# Altium footprint library Connectors.PcbLib: 63 footprints (part 3 of 4)
Each footprint in its own frame and in the unit in brackets; x right, y up, seen from the top. Pads: shape width x height; smd on the part's side, far side on the other; paste and mask are expansions set on the pad; w line width, h text height; cw(c..) or ccw(c..) is an arc to the next point about the centre after c.
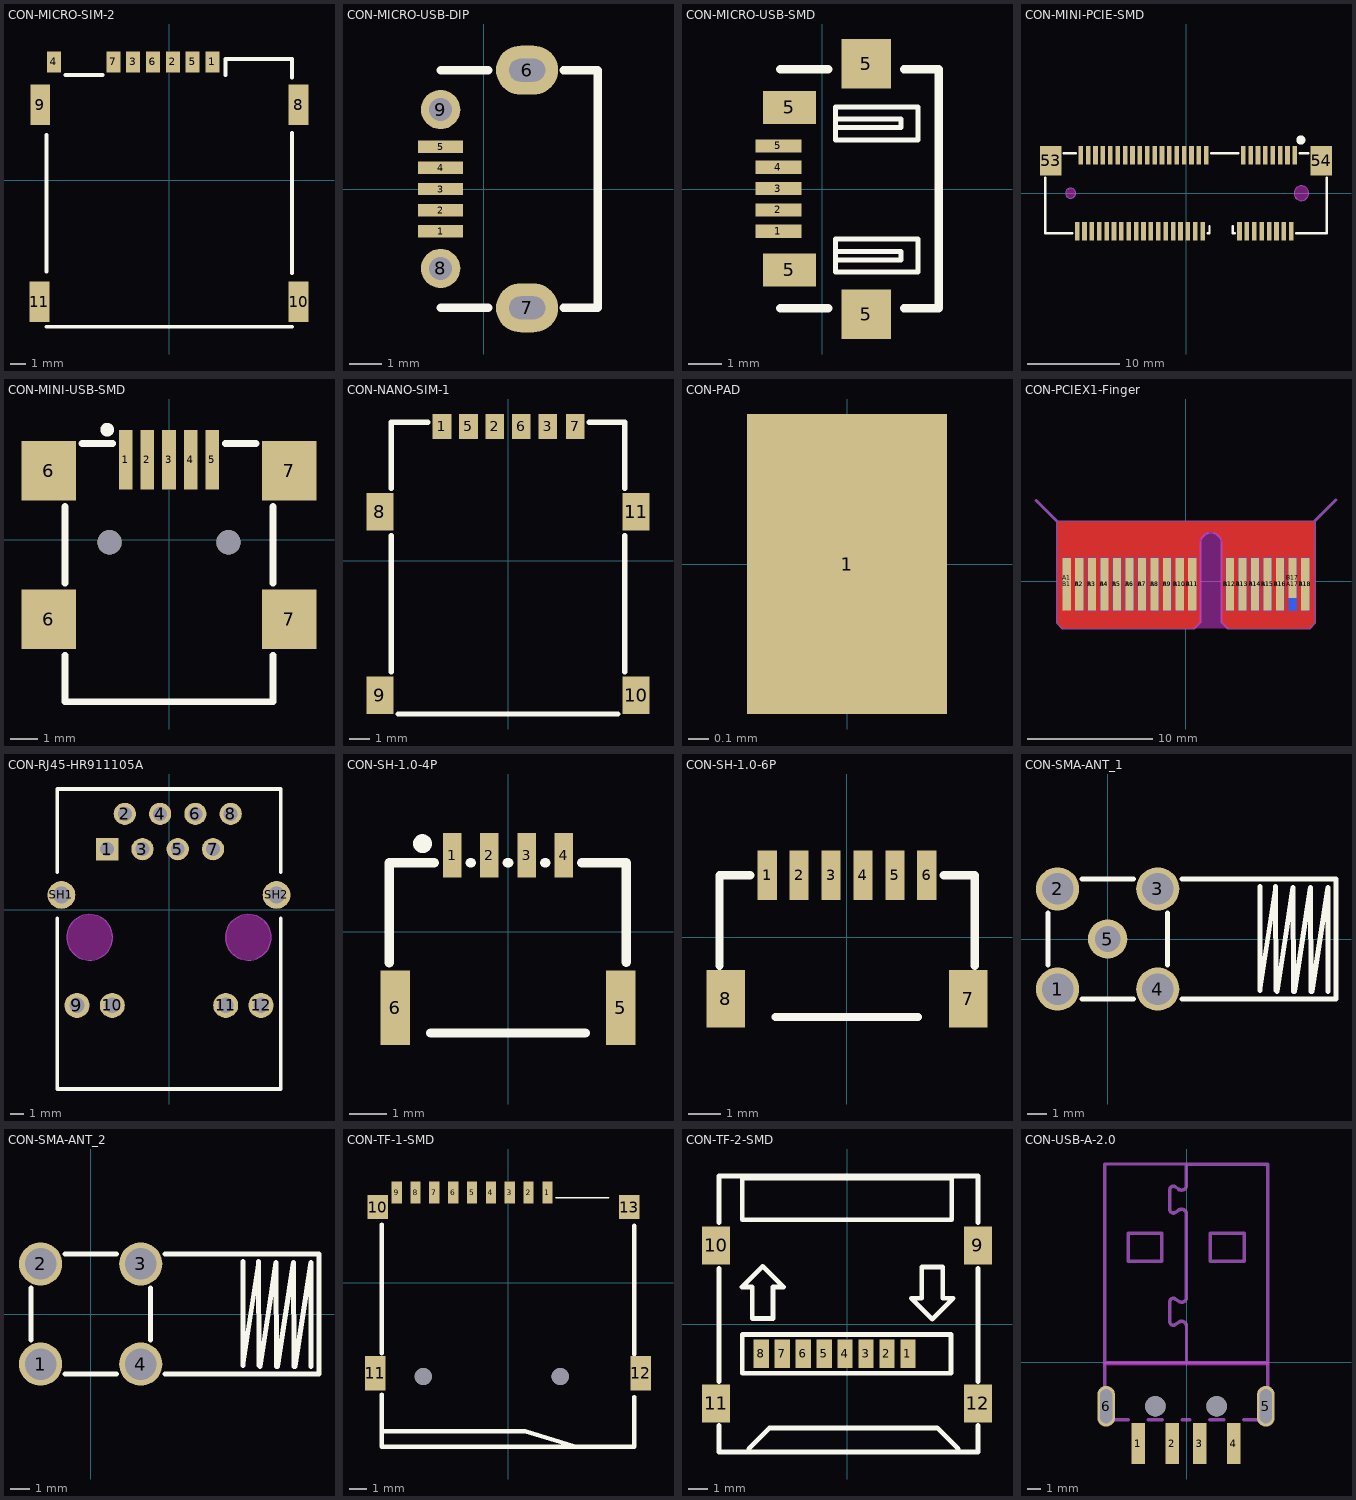
[diagram p2: the footprints below, top view; thin cyan lines are the x and y axes]

## CON-MICRO-SIM-2 [mm] "SIM Card Socket Connectors"
pads (11):
  rect 0.9x1.35 smd: 1(2.782,7.59) 2(0.242,7.59) 3(-2.298,7.59) 4(-7.378,7.59) 5(1.512,7.59) 6(-1.028,7.59) 7(-3.568,7.59)
  rect 1.27x2.61 smd: 8(8.303,4.84) 9(-8.247,4.84) 10(8.303,-7.78) 11(-8.303,-7.78)
Top Overlay:
  lines w0.254: -7.858,-9.38 7.892,-9.38 ; -7.858,-5.85 -7.858,2.9 ; -6.63,6.75 -4.26,6.75 ; 3.627,6.75 3.627,7.78 7.892,7.78 7.892,6.57 ; 7.892,-5.94 7.892,3.02
3D body "SMD8.STEP": height 1.53, standoff -0.02, extent -8.375,-9.385 8.375,7.785

## CON-MICRO-USB-DIP [mil] "USB Micro SMT Connectors"
height 118.11
pads (9):
  rect 54x15 smd: 1(-52,-51) 2(-52,-25.5) 3(-52,0) 4(-52,25.5) 5(-52,51)
  oval 74.8x59.06 hole 27.56 slot 43.31 at 0 deg: 6(52,143) 7(52,-143)
  round 47.24 hole 27.5: 8(-52,-95.5) 9(-52,95.5)
Top Overlay:
  lines w10: -52,-142.72 5.28,-142.72 ; -52,142.72 5.28,142.72 ; 95.72,-142.72 136.98,-142.72 136.98,142.72 95.72,142.72
3D body "User Library-Micro USB-B_Molex_105017-0001.step": height 105.31, standoff -24.61, extent -61.33,-161.41 152.44,161.42

## CON-MICRO-USB-SMD [mm] "USB Micro SMT Connectors"
height 3
pads (9):
  rect 1.4x0.4 smd: 1(-1.333,-1.283) 2(-1.333,-0.635) 3(-1.333,0.013) 4(-1.333,0.66) 5(-1.333,1.308)
  rect 1.6x1 smd: 5(-1.003,-2.451) 5(-1.003,2.476)
  rect 1.5x1.5 smd: 5(1.333,-3.797) 5(1.333,3.797)
Top Overlay:
  lines w0.152: 0.394,-2.152 2.379,-2.152 2.379,-1.949 2.379,-1.898 0.394,-1.898 ; 0.394,1.861 2.379,1.861 2.379,2.115 0.394,2.115 ; 0.394,-2.513 0.394,-1.513 2.894,-1.513 2.894,-2.513 0.394,-2.513 ; 0.394,1.487 0.394,2.487 2.894,2.487 2.894,1.487 0.394,1.487
  lines w0.254: -1.28,-3.62 0.175,-3.62 ; -1.28,3.63 0.175,3.63 ; 2.472,-3.62 3.52,-3.62 3.52,3.63 2.472,3.63
3D body "USB-MICRO B型 ?": height 2.69, standoff -0.24, extent -1.628,-3.969 3.794,3.995

## CON-MINI-PCIE-SMD [mm] "PCIE-SMD_52P-P0.80_PCIE-52P"
pads (54):
  rect 0.5x2 smd paste+0 mask+0.051: 1(11.8,4.1) 2(11.4,-4.1) 3(11,4.1) 4(10.6,-4.1) 5(10.2,4.1) 6(9.8,-4.1) 7(9.4,4.1) 8(9,-4.1) 9(8.6,4.1) 10(8.2,-4.1) 11(7.8,4.1) 12(7.4,-4.1) 13(7,4.1) 14(6.6,-4.1) 15(6.2,4.1) 16(5.8,-4.1) 17(2.2,4.1) 18(1.8,-4.1) 19(1.4,4.1) 20(1,-4.1) 21(0.6,4.1) 22(0.2,-4.1) 23(-0.2,4.1) 24(-0.6,-4.1) 25(-1,4.1) 26(-1.4,-4.1) 27(-1.8,4.1) 28(-2.2,-4.1) 29(-2.6,4.1) 30(-3,-4.1) 31(-3.4,4.1) 32(-3.8,-4.1) 33(-4.2,4.1) 34(-4.6,-4.1) 35(-5,4.1) 36(-5.4,-4.1) 37(-5.8,4.1) 38(-6.2,-4.1) 39(-6.6,4.1) 40(-7,-4.1) 41(-7.4,4.1) 42(-7.8,-4.1) 43(-8.2,4.1) 44(-8.6,-4.1) 45(-9,4.1) 46(-9.4,-4.1) 47(-9.8,4.1) 48(-10.2,-4.1) 49(-10.6,4.1) 50(-11,-4.1) 51(-11.4,4.1) 52(-11.8,-4.1)
  rect 2.3x3.2 smd paste+0 mask+0.051: 53(-14.65,3.5) 54(14.65,3.5)
Top Overlay:
  circle w0.5: c12.45,5.77 r0.25
  lines w0.254: -15.239,1.669 -15.239,-4.318 -14.985,-4.318 -12.331,-4.318 ; -13.269,4.318 -11.931,4.318 ; 2.331,-4.318 2.54,-4.318 2.54,-3.556 ; 2.731,4.318 5.669,4.318 ; 5.081,-3.556 5.081,-4.318 5.269,-4.318 ; 11.931,-4.318 14.987,-4.318 15.241,-4.318 15.241,1.669 ; 12.331,4.318 13.269,4.318
Keep-Out Layer:
  board cut-out: -13.05,0 -13.05,-0.11 -12.966,-0.312 -12.811,-0.466 -12.609,-0.55 -12.39,-0.55 -12.188,-0.466 -12.034,-0.312 -11.95,-0.11 -11.95,0 -11.95,0.109 -12.034,0.311 -12.188,0.466 -12.39,0.55 -12.609,0.55 -12.811,0.466 -12.966,0.311 -13.05,0.109
  board cut-out: 11.7,0 11.7,-0.105 11.755,-0.309 11.86,-0.491 12.009,-0.64 12.191,-0.746 12.395,-0.8 12.605,-0.8 12.809,-0.746 12.991,-0.64 13.14,-0.491 13.246,-0.309 13.3,-0.105 13.3,0 13.3,0.105 13.246,0.309 13.14,0.491 12.991,0.64 12.809,0.745 12.605,0.8 12.395,0.8 12.191,0.745 12.009,0.64 11.86,0.491 11.755,0.309 11.7,0.105
Mechanical 1:
  circle w0.005: c-12.5,0 r0.55
  circle w0.005: c12.5,0 r0.8
3D body "2041119-1.stp": height 4.05, standoff -0.6, extent -14.95,-4.11 14.95,4.98

## CON-MINI-USB-SMD [mm] "USB Connectors"
pads (11):
  rect 0.5x2.2 smd: 1(-1.6,2.95) 2(-0.8,2.95) 3(0,2.95) 4(0.8,2.95) 5(1.6,2.95)
  rect 2x2.2 smd: 6(-4.45,-2.95) 6(-4.45,2.55) 7(4.45,-2.95) 7(4.45,2.55)
  round 0.9 hole 0.9 unplated: ""(-2.2,-0.1) ""(2.2,-0.1)
Top Overlay:
  circle w0.254: c-2.286,4.064 r0.127
  lines w0.254: -3.85,-4.281 -3.85,-6 3.85,-6 3.85,-4.281 ; -3.85,-1.619 -3.85,1.219 ; -3.219,3.556 -2.081,3.556 ; 2.081,3.556 3.219,3.556 ; 3.85,-1.619 3.85,1.219
3D body "usb_a-usb_b-m5-smd-c.stp": height 4.02, standoff -0.83, extent -4.95,-6 4.95,3.2

## CON-NANO-SIM-1 [mm] "SIM Card Socket Connectors"
pads (10):
  rect 0.9x1.2 smd: 1(-3.17,6.45) 2(-0.63,6.45) 3(1.91,6.45) 5(-1.9,6.45) 6(0.64,6.45) 7(3.225,6.45)
  rect 1.3x1.8 smd: 8(-6.15,2.35) 9(-6.15,-6.45) 10(6.15,-6.45) 11(6.15,2.35)
Top Overlay:
  lines w0.254: -5.6,-5.319 -5.6,1.219 ; -5.6,3.481 -5.6,6.65 -3.851,6.65 ; -5.269,-7.35 5.269,-7.35 ; 3.906,6.65 5.6,6.65 5.6,3.481 ; 5.6,-5.319 5.6,1.219
3D body "SMD.step": height 1.51, standoff 0, extent -6.2,-7.404 6.2,6.796

## CON-PAD [mm] "CONNECTOR"
pads (1):
  rect 1x1.5 smd: 1(0,0)

## CON-PCIEX1-Finger [mm] "PCI-E X1 FInger"
height 2.8
pads (36):
  rect 0.65x3.2 smd far side paste-1 mask+0.051: A1(-9.5,0.25)
  rect 0.65x4.2 smd far side paste-1 mask+0.051: A2(-8.5,-0.25) A3(-7.5,-0.25) A4(-6.5,-0.25) A5(-5.5,-0.25) A6(-4.5,-0.25) A7(-3.5,-0.25) A8(-2.5,-0.25) A9(-1.5,-0.25) A10(-0.5,-0.25) A11(0.5,-0.25) A12(3.5,-0.25) A13(4.5,-0.25) A14(5.5,-0.25) A15(6.5,-0.25) A16(7.5,-0.25) A17(8.5,-0.25) A18(9.5,-0.25)
  rect 0.65x4.2 smd paste-1 mask+0.051: B1(-9.5,-0.25) B2(-8.5,-0.25) B3(-7.5,-0.25) B4(-6.5,-0.25) B5(-5.5,-0.25) B6(-4.5,-0.25) B7(-3.5,-0.25) B8(-2.5,-0.25) B9(-1.5,-0.25) B10(-0.5,-0.25) B11(0.5,-0.25) B12(3.5,-0.25) B13(4.5,-0.25) B14(5.5,-0.25) B15(6.5,-0.25) B16(7.5,-0.25) B18(9.5,-0.25)
  rect 0.65x3.2 smd paste-1 mask+0.051: B17(8.5,0.25)
Top Layer:
  pour cut-out: -9.828,-3.742 -10.237,-3.333 -10.237,4.713 10.198,4.713 10.24,4.754 10.24,-3.331 9.828,-3.742 3.358,-3.742 2.895,-3.28 2.895,3.013 2.887,3.13 2.826,3.356 2.709,3.559 2.544,3.725 2.341,3.842 2.114,3.903 1.88,3.903 1.654,3.842 1.451,3.725 1.285,3.559 1.168,3.356 1.107,3.13 1.1,3.013 1.1,-3.28 0.637,-3.742
Bottom Layer:
  pour cut-out: -9.828,-3.742 -10.237,-3.333 -10.237,4.713 10.198,4.713 10.24,4.754 10.24,-3.331 9.828,-3.742 3.358,-3.742 2.895,-3.28 2.895,3.013 2.887,3.13 2.826,3.356 2.709,3.559 2.544,3.725 2.341,3.842 2.114,3.903 1.88,3.903 1.654,3.842 1.451,3.725 1.285,3.559 1.168,3.356 1.107,3.13 1.1,3.013 1.1,-3.28 0.637,-3.742
Top Solder:
  rectangle: -10.237,-2.522 1.1,2.015
  region: 10.198,2.015 2.895,2.015 2.895,-2.522 10.198,-2.522
Bottom Solder:
  region: 10.198,2.015 2.895,2.015 2.895,-2.522 10.198,-2.522
  rectangle: -10.237,-2.522 1.1,2.015
Keep-Out Layer:
  board cut-out: 0.637,-3.742 1.1,-3.28 1.1,3.013 1.1,3.131 1.161,3.359 1.279,3.564 1.446,3.731 1.651,3.849 1.879,3.91 2.115,3.91 2.344,3.849 2.548,3.731 2.715,3.564 2.834,3.359 2.895,3.131 2.895,3.013 2.895,-3.28 3.358,-3.742
Mechanical 15:
  lines w0.254: -11.95,6.426 -10.237,4.713 ; 11.953,6.467 10.24,4.754 10.198,4.713 ; -10.237,4.713 -10.237,-3.333 -9.828,-3.742 0.637,-3.742 1.1,-3.28 1.1,3.013 ; -10.237,4.713 10.198,4.713 ; 1.1,3.013 cw(c1.997,3.013) 2.895,3.013 ; 1.1,3.013 1.1,3.013 ; 2.895,3.013 2.895,-3.28 3.358,-3.742 ; 2.895,3.013 2.895,3.013 ; 3.358,-3.742 9.828,-3.742 10.24,-3.331 10.24,4.672 10.198,4.713 ; 3.358,-3.742 3.358,-3.742

## CON-RJ45-HR911105A [mm]
pads (14):
  rect 1.6x1.6 hole 1: 1(-4.45,4.355)
  round 1.6 hole 1: 2(-3.18,6.895) 3(-1.91,4.355) 4(-0.64,6.895) 5(0.63,4.355) 6(1.9,6.895) 7(3.17,4.355) 8(4.44,6.895)
  round 1.8 hole 1.1: 9(-6.625,-6.895) 10(-4.085,-6.895) 11(4.085,-6.895) 12(6.625,-6.895)
  round 2 hole 1.2: SH1(-7.745,1.055) SH2(7.745,1.055)
Top Overlay:
  lines w0.254: -8.05,-0.615 -8.05,-12.915 8.05,-12.915 8.05,-0.615 ; -8.05,2.685 -8.05,8.685 8.05,8.685 ; 8.05,2.685 8.05,8.685
Keep-Out Layer:
  board cut-out: 7.365,-1.995 7.365,-2.158 7.302,-2.476 7.177,-2.777 6.997,-3.047 6.767,-3.277 6.497,-3.457 6.196,-3.582 5.878,-3.645 5.552,-3.645 5.234,-3.582 4.933,-3.457 4.663,-3.277 4.433,-3.047 4.253,-2.777 4.128,-2.476 4.065,-2.158 4.065,-1.995 4.065,-1.833 4.128,-1.514 4.253,-1.213 4.433,-0.943 4.663,-0.713 4.933,-0.533 5.234,-0.408 5.552,-0.345 5.878,-0.345 6.196,-0.408 6.497,-0.533 6.767,-0.713 6.997,-0.943 7.177,-1.213 7.302,-1.514 7.365,-1.833 7.365,-1.995
  board cut-out: -4.065,-1.995 -4.065,-2.158 -4.128,-2.476 -4.253,-2.777 -4.433,-3.047 -4.663,-3.277 -4.933,-3.457 -5.234,-3.582 -5.552,-3.645 -5.878,-3.645 -6.196,-3.582 -6.497,-3.457 -6.767,-3.277 -6.997,-3.047 -7.177,-2.777 -7.302,-2.476 -7.365,-2.158 -7.365,-1.995 -7.365,-1.833 -7.302,-1.514 -7.177,-1.213 -6.997,-0.943 -6.767,-0.713 -6.497,-0.533 -6.196,-0.408 -5.878,-0.345 -5.552,-0.345 -5.234,-0.408 -4.933,-0.533 -4.663,-0.713 -4.433,-0.943 -4.253,-1.213 -4.128,-1.514 -4.065,-1.833 -4.065,-1.995
Mechanical 1:
  circle w0.003: c5.715,-1.995 r1.65
  circle w0.003: c-5.715,-1.995 r1.65
3D body "RJ45-TH_HR911105A.x_t": height 13.84, standoff -3.3, extent -7.934,-13.054 7.934,8.536

## CON-SH-1.0-4P [mm] "SH-1.0mm-1x4P"
pads (6):
  rect 0.5x1.2 smd mask+0.05: 1(-1.5,2.05) 2(-0.5,2.05) 3(0.5,2.05) 4(1.5,2.05)
  rect 0.8x2 smd mask+0.05: 5(3.025,-2.05) 6(-3.025,-2.05)
Top Overlay:
  circle w0.254: c-2.294,2.358 r0.127
  lines w0.254: -3.183,-0.834 -3.183,1.85 -1.981,1.85 ; -2.069,-2.722 2.069,-2.722 ; -1.019,1.85 -0.981,1.85 ; -0.019,1.85 0.019,1.85 ; 0.981,1.85 1.019,1.85 ; 1.981,1.85 3.167,1.85 3.167,-0.829
3D body "4P.STEP": height 2.9, standoff 0, extent -3.175,-2.722 3.175,2.228

## CON-SH-1.0-6P [mm] "SH-1.0mm-6P"
pads (8):
  rect 0.6x1.55 smd mask+0.051: 1(-2.5,1.939) 2(-1.5,1.939) 3(-0.498,1.936) 4(0.501,1.937) 5(1.502,1.937) 6(2.502,1.937)
  rect 1.2x1.8 smd mask+0.051: 7(3.801,-1.939) 8(-3.801,-1.937)
Top Overlay:
  lines w0.254: -3.998,-0.899 -3.998,1.935 -3.032,1.935 ; -2.238,-2.507 2.222,-2.507 ; 3.033,1.935 4.003,1.935 4.003,-0.902
Mechanical 15:
  region: 3.701,-1.439 3.901,-1.439 3.901,-2.439 3.701,-2.439
  region: -3.901,-1.437 -3.701,-1.437 -3.701,-2.437 -3.901,-2.437
3D body "User Library-JST - SM06B-SRSS-TB (SH SERIES - 1_0mm PITCH WIRE-TO-BOARD, SMT, RA).STEP": height 2.9, standoff 0, extent -4.008,-2.507 3.992,2.443

## CON-SMA-ANT_1 [mm] "SMA天线座"
pads (5):
  round 2.2 hole 1.6 paste-2539.97 mask+0.051: 1(-2.55,-2.55) 2(-2.55,2.55) 3(2.55,2.55)
  round 2.2 hole 1.6 copper offset 0,0 paste-2539.97 mask+0.051: 4(2.55,-2.55)
  round 2 hole 1.3 paste-2539.97 mask+0.051: 5(0,0)
Top Overlay:
  lines w0.254: -3.048,-1.316 -3.048,1.316 ; -1.316,-3.048 1.316,-3.048 ; -1.316,3.048 1.316,3.048 ; 3.048,-1.316 3.048,1.316 ; 3.784,-3.048 11.63,-3.048 ; 3.784,3.048 11.6,3.048 ; 7.747,2.667 7.747,-2.633 8.56,2.667 8.566,-2.633 ; 8.636,-2.667 9.449,2.633 9.456,-2.667 ; 9.525,-2.667 10.338,2.633 10.345,-2.667 ; 10.414,-2.667 11.227,2.633 11.234,-2.667 ; 11.63,-3 11.63,-2.62 11.63,2.68 11.63,3.048
Mechanical 10:
  region: 0.225,0 0.225,-0.045 0.191,-0.127 0.127,-0.191 0.045,-0.225 -0.045,-0.225 -0.127,-0.191 -0.191,-0.127 -0.225,-0.045 -0.225,0 -0.225,0.045 -0.191,0.127 -0.127,0.191 -0.045,0.225 0.045,0.225 0.127,0.191 0.191,0.127 0.225,0.045 0.225,0
Mechanical 11:
  region: -2.97,-3.017 -2.97,-3.029 -2.988,-3.047 -3.012,-3.047 -3.03,-3.029 -3.03,-3.017 -3.03,-3.005 -3.012,-2.987 -2.988,-2.987 -2.97,-3.005 -2.97,-3.017
Mechanical 12:
  region: 2.1,3 3,3 3,2.1 2.1,2.1
  region: 2.1,-2.1 3,-2.1 3,-3 2.1,-3
  region: -3,-2.1 -2.1,-2.1 -2.1,-3 -3,-3
  region: -3,3 -2.1,3 -2.1,2.1 -3,2.1
3D body "SMA-TH_BWSMA-KWE-Z001.x_t": height 9.65, standoff -3.5, extent -3.001,-3.149 11.5,3.15

## CON-SMA-ANT_2 [mm] "SMA天线座"
pads (4):
  round 2.2 hole 1.6 paste-2539.97 mask+0.051: 1(-2.55,-2.55) 2(-2.55,2.55) 3(2.55,2.55)
  round 2.2 hole 1.6 copper offset 0,0 paste-2539.97 mask+0.051: 4(2.55,-2.55)
Top Overlay:
  lines w0.254: -3.048,-1.316 -3.048,1.316 ; -1.316,-3.048 1.316,-3.048 ; -1.316,3.048 1.316,3.048 ; 3.048,-1.316 3.048,1.316 ; 3.784,-3.048 11.63,-3.048 ; 3.784,3.048 11.6,3.048 ; 7.747,2.667 7.747,-2.633 8.56,2.667 8.566,-2.633 ; 8.636,-2.667 9.449,2.633 9.456,-2.667 ; 9.525,-2.667 10.338,2.633 10.345,-2.667 ; 10.414,-2.667 11.227,2.633 11.234,-2.667 ; 11.63,-3 11.63,-2.62 11.63,2.68 11.63,3.048
Mechanical 11:
  region: -2.97,-3.017 -2.97,-3.029 -2.988,-3.047 -3.012,-3.047 -3.03,-3.029 -3.03,-3.017 -3.03,-3.005 -3.012,-2.987 -2.988,-2.987 -2.97,-3.005 -2.97,-3.017
Mechanical 12:
  region: 2.1,3 3,3 3,2.1 2.1,2.1
  region: 2.1,-2.1 3,-2.1 3,-3 2.1,-3
  region: -3,-2.1 -2.1,-2.1 -2.1,-3 -3,-3
  region: -3,3 -2.1,3 -2.1,2.1 -3,2.1
3D body "SMA-TH_BWSMA-KWE-Z001.x_t": height 9.65, standoff -3.5, extent -3.001,-3.149 11.5,3.15

## CON-TF-1-SMD [mm] "TF Card Connectors"
pads (15):
  rect 0.6x1.3 smd: 1(2.301,5.276) 2(1.201,5.276) 3(0.101,5.276) 4(-0.999,5.276) 5(-2.099,5.276) 6(-3.199,5.276) 7(-4.299,5.276) 8(-5.399,5.276) 9(-6.499,5.276)
  rect 1.2x1.4 smd: 10(-7.599,4.426) 13(7.081,4.426)
  rect 1.2x2 smd: 11(-7.76,-5.276) 12(7.76,-5.276)
  round 1 hole 1 unplated: ""(-4.95,-5.478) ""(3.05,-5.476)
Top Overlay:
  lines w0.102: 2.786,4.972 5.885,4.973
  lines w0.254: -7.366,-9.091 -7.366,-8.667 1,-8.666 3.937,-9.563 ; -7.366,-6.516 -7.366,-9.564 7.366,-9.564 7.366,-6.666 ; -7.366,-4.103 -7.366,3.406 ; 7.366,-4.167 7.366,3.326
Mechanical 15:
  circle w0.4: c3.05,-5.475 r0.2
  circle w0.4: c-4.95,-5.478 r0.2
3D body "User Library-Micro_SD_Socket_Push-push.step": height 1.9, standoff -0.55, extent -8.05,-9.564 8.05,5.439

## CON-TF-2-SMD [mm] "TF Card Connectors"
pads (12):
  rect 0.8x1.5 smd: 1(3.2,-1.55) 2(2.1,-1.55) 3(1,-1.55) 4(-0.1,-1.55) 5(-1.2,-1.55) 6(-2.3,-1.55) 7(-3.4,-1.55) 8(-4.5,-1.55)
  rect 1.45x2 smd: 9(6.88,4.15) 10(-6.88,4.15) 11(-6.88,-4.15) 12(6.88,-4.15)
Top Overlay:
  lines w0.254: -6.731,-5.3 -6.731,-6.7 6.89,-6.7 ; -6.731,-3 -6.731,2.95 ; -6.731,5.35 -6.731,7.787 ; -6.731,7.797 6.89,7.797 6.89,5.35 ; -6.71,-6.7 6.89,-6.7 ; -5.163,-6.662 -5.163,-6.531 -4.063,-5.432 4.737,-5.432 5.837,-6.532 5.837,-6.662 ; 6.89,-5.3 6.89,-6.7 ; 6.89,-3 6.89,2.95 ; -5.531,1.959 -4.98,2.51 -4.431,3.059 -3.88,2.51 -3.331,1.959 -3.88,1.959 -3.88,0.308 -4.98,0.308 -4.98,1.959 -5.531,1.959 ; -5.5,-2.562 -5.5,-0.53 5.461,-0.53 5.461,-2.562 -5.5,-2.562 ; -5.5,5.497 -5.5,7.697 5.5,7.697 5.5,5.497 -5.5,5.497 ; 3.379,1.372 3.928,1.372 3.928,3.023 5.028,3.023 5.028,1.372 5.579,1.372 5.028,0.821 4.479,0.272 3.928,0.821 3.379,1.372
3D body "500901-0801.stp": height 1.93, standoff -0.02, extent -7.22,-6.703 7.38,7.797

## CON-USB-A-2.0 [mm] "CON-USB-A-2.0"
pads (8):
  rect 1x3 smd: 1(-3.538,-5.974) 2(-1.038,-5.974) 3(0.962,-5.974) 4(3.462,-5.974)
  oval 1.3x3 hole 0.9 slot 2.5 at 90 deg: 5(5.837,-3.225) 6(-5.913,-3.225)
  round 1.5 hole 1.5 unplated: ""(-2.288,-3.224) ""(2.212,-3.224)
Top Paste:
  region: -5.263,-4.074 -5.263,-4.16 -5.307,-4.325 -5.393,-4.473 -5.514,-4.594 -5.662,-4.68 -5.827,-4.724 -5.998,-4.724 -6.164,-4.68 -6.312,-4.594 -6.433,-4.473 -6.518,-4.325 -6.563,-4.16 -6.563,-4.074 -6.563,-2.374 -6.563,-2.289 -6.518,-2.123 -6.433,-1.975 -6.312,-1.854 -6.164,-1.769 -5.998,-1.724 -5.827,-1.724 -5.662,-1.769 -5.514,-1.854 -5.393,-1.975 -5.307,-2.123 -5.263,-2.289 -5.263,-2.374
  region: 6.487,-4.074 6.487,-4.16 6.443,-4.325 6.357,-4.473 6.236,-4.594 6.088,-4.68 5.923,-4.724 5.751,-4.724 5.586,-4.68 5.438,-4.594 5.317,-4.473 5.231,-4.325 5.187,-4.16 5.187,-4.074 5.187,-2.374 5.187,-2.289 5.231,-2.123 5.317,-1.975 5.438,-1.854 5.586,-1.769 5.751,-1.724 5.923,-1.724 6.088,-1.769 6.236,-1.854 6.357,-1.975 6.443,-2.123 6.487,-2.289 6.487,-2.374
  region: 3.962,-7.474 2.962,-7.474 2.962,-4.474 3.962,-4.474
  region: 1.462,-7.474 0.462,-7.474 0.462,-4.474 1.462,-4.474
  region: -0.538,-7.474 -1.538,-7.474 -1.538,-4.474 -0.538,-4.474
  region: -3.038,-7.474 -4.038,-7.474 -4.038,-4.474 -3.038,-4.474
Keep-Out Layer:
  lines w0.254: -5.998,-0.089 5.992,-0.089
Mechanical 15:
  circle w0.375: c-2.288,-3.224 r0.188
  circle w0.375: c2.212,-3.224 r0.188
  lines w0.254: -6.042,-0.033 5.946,-0.033 ; -6.028,14.57 -6.024,-0.161 -6.024,-2.066 ; -6.007,-3.95 -6.007,-4.234 -4.269,-4.234 ; -5.987,14.601 -0.358,14.601 -0.018,14.601 ; -2.807,-4.234 -1.769,-4.234 ; -1.249,2.989 -1.249,4.462 ; -1.249,11.244 -1.249,12.691 ; -1.229,3.001 ccw(c-0.969,3.001) -0.82,2.788 ; -1.229,4.462 cw(c-0.969,4.459) -0.82,4.673 ; -1.229,11.251 ccw(c-0.969,11.251) -0.82,11.038 ; -1.229,12.712 cw(c-0.969,12.709) -0.82,12.922 ; -0.817,2.785 -0.563,2.963 ; -0.817,4.665 -0.563,4.487 ; -0.817,11.04 -0.563,11.218 ; -0.817,12.92 -0.563,12.742 -0.563,12.717 ; -0.556,2.968 cw(c-0.359,2.686) -0.02,2.742 ; -0.556,4.495 ccw(c-0.359,4.777) -0.02,4.721 ; -0.556,11.218 cw(c-0.359,10.936) -0.02,10.992 ; -0.556,12.745 ccw(c-0.359,13.027) -0.02,12.971 ; -0.307,-4.234 0.231,-4.234 ; -0.03,4.716 -0.03,10.99 ; -0.03,12.971 -0.03,14.596 5.964,14.596 5.964,-0.161 5.964,-2.066 ; -0.013,-0.013 0,0 0,2.774 ; 1.693,-4.234 2.731,-4.234 ; 4.193,-4.234 6.058,-4.234 6.058,-3.927 ; -4.297,7.459 -1.808,7.459 -1.808,9.516 -4.297,9.516 -4.297,7.459 ; 1.748,7.459 4.237,7.459 4.237,9.516 1.748,9.516 1.748,7.459
3D body "User Library-USB-6.step": height 3, standoff -2.44, extent -6.028,-6.43 5.972,14.57